# Altium schematic symbol library MAJ library.SchLib: 15 symbols
Pins are listed as number, name and electrical type; pins without a type are passive.

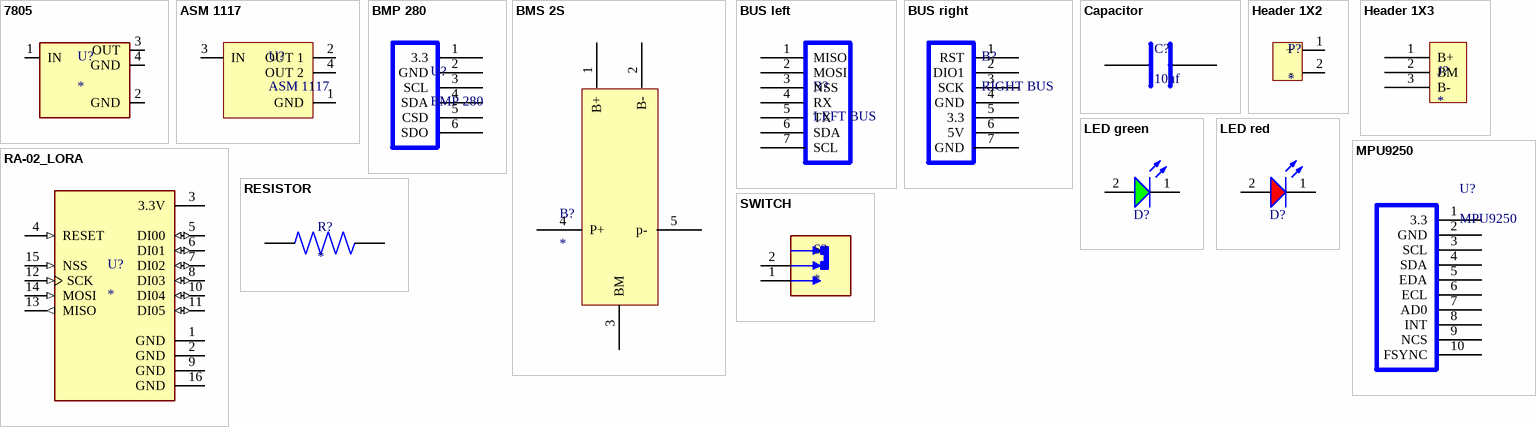
[diagram p0: symbols 7805 to SWITCH]

## 7805
designator U?
Linear Voltage Regulator IC 1 Output 1A SOT-223; MP: AZ1117EH-5.0TRG1; MF: Diodes Inc.; Package: SOT-223 Diodes Inc.; Digi-Key_Part_Number: AZ1117EH-5.0TRG1DICT-ND; SnapEDA_Link: https://www.snapeda.com/parts/AZ1117EH-5.0TRG1/Diodes%20Inc./view-part/795858/?ref=snap; Purchase-URL: https://pricing.snapeda.com/search/part/AZ1117EH-5.0TRG1/?ref=eda; Check_prices: https://www.snapeda.com/parts/AZ1117EH-5.0TRG1/Diodes%20Inc./view-part/795858/?ref=eda; Value: *
footprint 7805
pins: 1 IN (power), 2 GND (power), 3 OUT (power), 4 GND (power)

## ASM 1117
designator U?
footprint 7805
pins: 1  GND, 2  OUT 1, 3 IN, 4 OUT 2

## BMP 280
designator U?
footprint BMP 280
pins: 1 3.3, 2 GND, 3 SCL, 4 SDA, 5 CSD, 6 SDO

## BMS 2S
designator B?
footprint BMS 2S
pins: 1 B+, 2 B-, 3 BM, 4 P+, 5 p-

## BUS left
designator B?, comment LEFT BUS
footprint bus right
pins: 1 MISO, 2 MOSI, 3 NSS, 4 RX, 5 TX, 6 SDA, 7 SCL

## BUS right
designator B?, comment RIGHT BUS
footprint bus left
pins: 1 RST, 2 DIO1, 3 SCK, 4  GND, 5 3.3, 6 5V, 7 GND

## Capacitor
designator C?, comment 10uf
footprint capacitor
pins: 11, 12   

## Header 1X2
designator P?
footprint Header 2 pin
pins: 1 +, 2 -

## Header 1X3
designator J?
footprint Header 1X3
pins: 1 B+, 2 BM, 3 B-

## LED green
designator D?, comment Bright Green, 2V, 140°  (value not drawn)
WL-SMCD Mono-color Chip LED Diffused, SMT, size 0603, Bright Green, 2V, 140°; Manufacturer Part Number: 150060VS55040; Manufacturer: Wurth Elektronik; Case/Size Code: 0603; Chip Technology: AlInGaP; Dominant Wavelength: 573nm; Luminous Intensity: 60mcd; Peak Wavelength: 575nm; Category: Signal LEDs; Match Code: WL-SMCD; ComponentLink1Description: Website Link; ComponentLink1URL: https://www.we-online.com/redexpert/article/150060VS55040?ad; ComponentLink2Description: Datasheet Link; ComponentLink2URL: https://www.we-online.com/redexpert/spec/150060VS55040?ad; Mount: Surface Mount; Operating Temperature Max: 85°C; Operating Temperature Min: -40°C; Packaging: Tape and Reel; Length: 1.6mm; Width: 0.8mm; Height: 0.4mm; Emitting Color: Bright Green; Forward Voltage: 2V; Viewing Angle: 140°
footprint LED green (SMD Mono-color Chip LED, body 1.6x0.8mm)
pins: 1 K, 2 A

## LED red
designator D?, comment Super Red, 2V, 140°  (value not drawn)
WL-SMCD Mono-color Chip LED Diffused, SMT, size 0603, Super Red, 2V, 140°; Manufacturer Part Number: 150060SS55040; Manufacturer: Wurth Elektronik; Case/Size Code: 0603; Chip Technology: AlInGaP; Dominant Wavelength: 630nm; Luminous Intensity: 70mcd; Peak Wavelength: 645nm; Category: Signal LEDs; Match Code: WL-SMCD; ComponentLink1Description: Website Link; ComponentLink1URL: https://www.we-online.com/redexpert/article/150060SS55040?ad; ComponentLink2Description: Datasheet Link; ComponentLink2URL: https://www.we-online.com/redexpert/spec/150060SS55040?ad; Mount: Surface Mount; Operating Temperature Max: 85°C; Operating Temperature Min: -40°C; Packaging: Tape and Reel; Length: 1.6mm; Width: 0.8mm; Height: 0.4mm; Emitting Color: Super Red; Forward Voltage: 2V; Viewing Angle: 140°
footprint LED red (SMD Mono-color Chip LED, body 1.6x0.8mm)
pins: 1 K, 2 A

## MPU9250
designator U?
footprint MPU 9250
pins: 1 3.3, 2 GND, 3 SCL, 4 SDA, 5 EDA, 6 ECL, 7 AD0, 8 INT, 9 NCS, 10 FSYNC

## RA-02_LORA
designator U?
Ra-02 LoRa RF M5Stack Platform Evaluation Expansion Board; MF: AI-Thinker; SnapEDA_Link: https://www.snapeda.com/parts/Ra-02%20LoRa/AI-Thinker/view-part/?ref=snap; Package: None; Value: *; MP: Ra-02 LoRa; Check_prices: https://www.snapeda.com/parts/Ra-02%20LoRa/AI-Thinker/view-part/?ref=eda
footprint MODULE_RA-02_LORA
pins: 1 GND (power), 2 GND (power), 3 3.3V (power), 4 RESET (in), 5 DI00 (io), 6 DI01 (io), 7 DI02 (io), 8 DI03 (io), 9 GND (power), 10 DI04 (io), 11 DI05 (io), 12 SCK (in), 13 MISO (out), 14 MOSI (in), 15 NSS (in), 16 GND (power)

## RESISTOR
designator R?
RES SMD 270 OHM 5% 0.4W 0805; MP: ESR10EZPJ271; Package: None; Price: None; Value: *; Availability: Unavailable
footprint RESISTOR
pins: 1, 2

## SWITCH
designator S?
Slide Switch SPST Through Hole; MF: C&K; MP: S101031MS02Q; SnapEDA_Link: https://www.snapeda.com/parts/S101031MS02Q/C%2526K/view-part/?ref=snap; Purchase-URL: https://pricing.snapeda.com/search/part/S101031MS02Q/?ref=eda; Package: None; Price: None; Availability: In Stock; Value: *; Check_prices: https://www.snapeda.com/parts/S101031MS02Q/C%2526K/view-part/?ref=eda
footprint SWITCH
pins: 1, 2